# Altium schematic symbol library Data_Converters.SchLib: 4 symbols
Pins are listed as number, name and electrical type; pins without a type are passive.

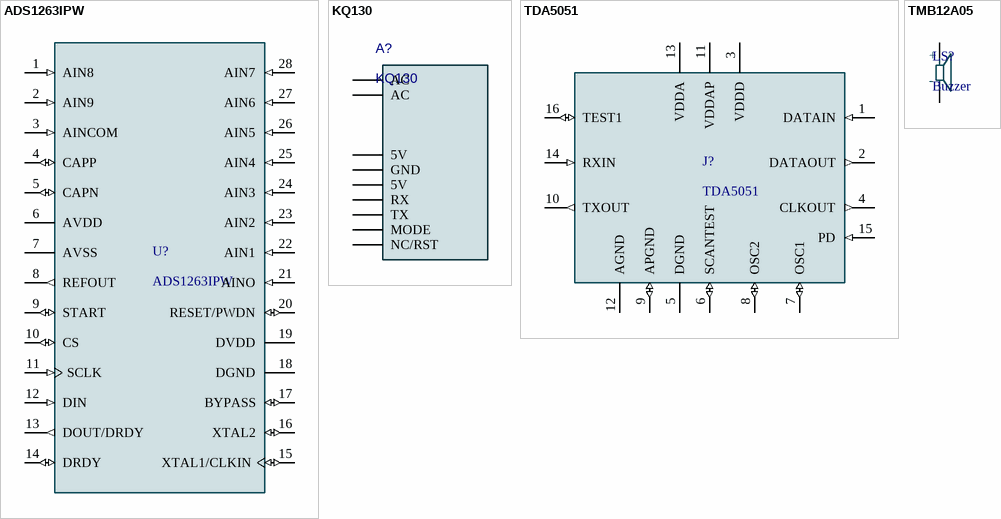
[diagram p0: symbols ADS1263IPW to TMB12A05]

## ADS1263IPW
designator U?
32-bit 38-kSPS 10-ch delta-sigma ADC with PGA, VREF and auxiliary ADC for factory automation 28-TSSOP -40 to 125; MF: Texas Instruments; Availability: Unavailable; Mouser-Purchase-URL: https://snapeda.com/shop?store=Mouser&id=513740; Value: ADC; Texas_Instruments-Purchase-URL: https://snapeda.com/shop?store=Texas+Instruments&id=513740; DigiKey-Purchase-URL: https://snapeda.com/shop?store=DigiKey&id=513740; Package: TSSOP-28 Texas Instruments; SnapEDA_Link: https://www.snapeda.com/parts/ADS1263IPW/Texas%20Instruments/view-part/513740/?ref=snap; Price: None; MP: ADS1263IPW
footprint ADS1263IPW (SOP65P640X120-28N)
pins: 1 AIN8 (in), 2 AIN9 (in), 3 AINCOM (in), 4 CAPP (io), 5 CAPN (io), 6 AVDD (power), 7 AVSS (power), 8 REFOUT (out), 9 START (io), 10 CS (io), 11 SCLK (in), 12 DIN (in), 13 DOUT/DRDY (out), 14 DRDY (io), 15 XTAL1/CLKIN (io), 16 XTAL2 (io), 17 BYPASS (io), 18 DGND (power), 19 DVDD (power), 20 RESET/PWDN (io), 21 AINO (in), 22 AIN1 (in), 23 AIN2 (in), 24 AIN3 (in), 25 AIN4 (in), 26 AIN5 (in), 27 AIN6 (in), 28 AIN7 (in)

## KQ130
designator A?
MODULE POWER LINE COMMUNICATIONS; Install: Yes; Manufacturer: *; MPN: KQ130; Package: *; Type: THD
footprint KQ130 (MODULE POWER LINE COMMUNICATIONS)
pins: 1 AC, 2 AC, 3 5V, 4 GND, 5 5V, 6 RX, 7 TX, 8 MODE, 9 NC/RST

## TDA5051
designator J?
1.2k Modem ASK over Home Power Lines 16-SO; MF: NXP USA; SnapEDA_Link: https://www.snapeda.com/parts/TDA5051/NXP+Semiconductors/view-part/?ref=snap; Package: SOIC-16 NXP Semiconductors; Value: *; MP: TDA5051; Check_prices: https://www.snapeda.com/parts/TDA5051/NXP+Semiconductors/view-part/?ref=eda
footprint TDA5051 (SO16W)
pins: 1 DATAIN (in), 2 DATAOUT (out), 3 VDDD (power), 4 CLKOUT (out), 5 DGND (power), 6 SCANTEST (io), 7 OSC1 (io), 8 OSC2 (io), 9 APGND (io), 10 TXOUT (out), 11 VDDAP (power), 12 AGND (power), 13 VDDA (power), 14 RXIN (in), 15 PD (in), 16 TEST1 (io)

## TMB12A05
designator LS?, comment Buzzer
12 mm, 5 V, 85 dB, Through Hole, Sealed, Magnetic Audio Transducer Buzzer; MF: Same Sky; MP: CEM-1206S; SnapEDA_Link: https://www.snapeda.com/parts/CEM-1206S/Same+Sky/view-part/?ref=snap; Package: None; Value: *; Check_prices: https://www.snapeda.com/parts/CEM-1206S/Same+Sky/view-part/?ref=eda
footprint TMB12A05 (TMB12A05-1508)
pins: N, P
text: +; -